# Altium schematic symbol library 6Cnts SMT.SchLib: 1 symbol
Pins are listed as number, name and electrical type; pins without a type are passive.

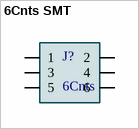
[diagram p0: symbol 6Cnts SMT]

## 6Cnts SMT
designator J?, comment 6Cnts
6Cnts SMT; MP: 95278-101A06LF; MF: AMPHENOL ICC / FCI; Availability: Unavailable; Value: *; Package: None; Price: None
footprint 6Cnts SMT
pins: 1, 2, 3, 4, 5, 6